# Altium schematic symbol library Communication-LIB-SCH.SchLib: 19 symbols
Pins are listed as number, name and electrical type; pins without a type are passive.

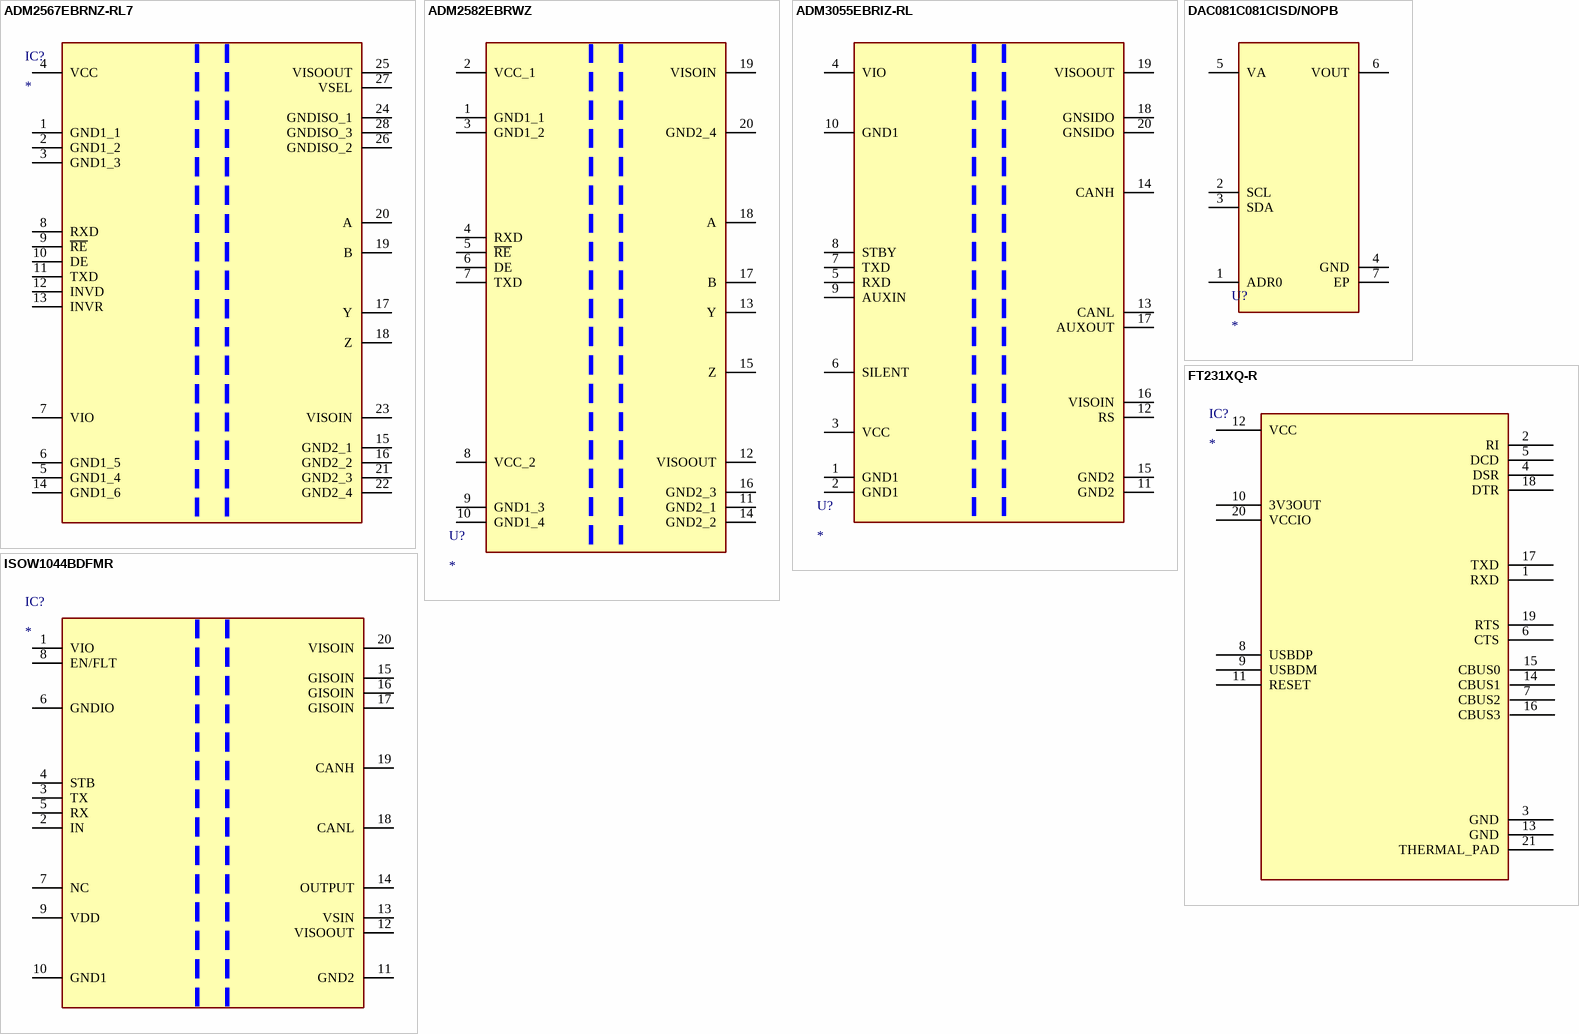
[diagram p0: symbols ADM2567EBRNZ-RL7 to ISOW1044BDFMR]

## ADM2567EBRNZ-RL7
designator IC?
Iso RS485 Transceiver; Manufacturer: Analog Devices; Manufacturer Part Number: ADM2567EBRNZ-RL7; Population Status: YES; Datasheet Link: https://www.analog.com/ADM2567E/datasheet; Height: 2.65mm; Supplier Part Number: 584-ADM2567EBRNZ-RL7
footprint SOP65P1030X265-28N
pins: 1 GND1_1, 2 GND1_2, 3 GND1_3, 4 VCC, 5 GND1_4, 6 GND1_5, 7 VIO, 8 RXD, 9 ~{RE}, 10 DE, 11 TXD, 12 INVD, 13 INVR, 14 GND1_6, 15 GND2_1, 16 GND2_2, 17 Y, 18 Z, 19 B, 20 A, 21 GND2_3, 22 GND2_4, 23 VISOIN, 24 GNDISO_1, 25 VISOOUT, 26 GNDISO_2, 27 VSEL, 28 GNDISO_3

## ADM2582EBRWZ
designator U?
RS422, RS485 Digital Isolator 2500Vrms 2 Channel 16Mbps 25kV/µs CMTI 20-SOIC (0.295", 7.50mm Width); Manufacturer: Analog Devices; Manufacturer Part Number: ADM2582EBRWZ; Max Current: 230mA; Supply Voltage: 3 to 5.5V; Est Price INR: 1,933.93; Population Status: YES; Datasheet Link: https://www.analog.com/media/en/technical-documentation/data-sheets/adm2582e-2587e.pdf; Height: 2.65mm; Supplier Part Number: 505-ADM2582EBRWZ-ND; Package: SOIC-20; Supplier: Digikey; Temperature Range: -40 to 85; Weight: 801mg
footprint SOIC127P1032X265-20N
pins: 1 GND1_1, 2 VCC_1, 3 GND1_2, 4 RXD, 5 ~{RE}, 6 DE, 7 TXD, 8 VCC_2, 9 GND1_3, 10 GND1_4, 11 GND2_1, 12 VISOOUT, 13 Y, 14 GND2_2, 15 Z, 16 GND2_3, 17 B, 18 A, 19 VISOIN, 20 GND2_4

## ADM3055EBRIZ-RL
designator U?
1/1 Transceiver, Isolated Half CANbus 12Mbit/s 20-SOIC-IC; Manufacturer: Analog Devices; Manufacturer Part Number: ADM3055EBRIZ-RL; Max Current: 177mA; Supply Voltage: 0.5 to 6V; Est Price INR: 1,719.17; Population Status: YES; Datasheet Link: https://www.analog.com/media/en/technical-documentation/data-sheets/ADM3055E-3057E.pdf; Height: 2.64mm; Supplier Part Number: 584-ADM3055EBRIZ-RL; Package: SOIC-20; Supplier: Mouser; Temperature Range: -40 to 105; Weight: 5.423 g
footprint SOIC127P1030X264-20N
pins: 1 GND1, 2 GND1, 3 VCC, 4 VIO, 5 RXD, 6 SILENT, 7 TXD, 8 STBY, 9 AUXIN, 10 GND1, 11 GND2, 12 RS, 13 CANL, 14 CANH, 15 GND2, 16 VISOIN, 17 AUXOUT, 18 GNSIDO, 19 VISOOUT, 20 GNSIDO

## DAC081C081CISD/NOPB
designator U?
8 Bit Digital to Analog Converter 1 6-WSON (2.2x2.5); Manufacturer Part Number: DAC081C081CISD/NOPB; Manufacturer: Texas Instruments; Est Price INR: 131.38; Population Status: YES; Supply Voltage: 2.7 to 5.5V; Datasheet Link: http://www.ti.com/lit/gpn/dac081c081; Height: 0.8mm; Package: WSON-6; Supplier Part Number: 926-DA081C081CISDNPB; Supplier: Mouser; Temperature Range: -40 to 125; Weight: 9.7mg
footprint SON65P250X220X80-7N
pins: 1 ADR0, 2 SCL, 3 SDA, 4 GND, 5 VA, 6 VOUT, 7 EP

## FT231XQ-R
designator IC?
Integrated Circuit; Manufacturer: FTDI Chip; Manufacturer Part Number: FT231XQ-R; Population Status: YES; Datasheet Link: http://www.ftdichip.com/Support/Documents/DataSheets/ICs/DS_FT231X.pdf; Height: 0.8mm; Supplier Part Number: 895-FT231XQ-R
footprint QFN50P400X400X80-21N
pins: 1 RXD, 2 RI, 3 GND, 4 DSR, 5 DCD, 6 CTS, 7 CBUS2, 8 USBDP, 9 USBDM, 10 3V3OUT, 11 RESET, 12 VCC, 13 GND, 14 CBUS1, 15 CBUS0, 16 CBUS3, 17 TXD, 18 DTR, 19 RTS, 20 VCCIO, 21 THERMAL_PAD

## ISOW1044BDFMR
designator IC?
Integrated Circuit; Manufacturer: Texas Instruments; Manufacturer Part Number: ISOW1044BDFMR; Population Status: YES; Datasheet Link: https://www.ti.com/lit/ds/symlink/isow1044.pdf?ts=1645295421849&ref_url=https%253A%252F%252Fwww.google.com%252F; Height: 3.55mm; Supplier Part Number: 595-ISOW1044BDFMR
footprint SOIC127P1030X355-20N
pins: 1 VIO, 2 IN, 3 TX, 4 STB, 5 RX, 6 GNDIO, 7 NC, 8 EN/FLT, 9 VDD, 10 GND1, 11 GND2, 12 VISOOUT, 13 VSIN, 14 OUTPUT, 15 GISOIN, 16 GISOIN, 17 GISOIN, 18 CANL, 19 CANH, 20 VISOIN

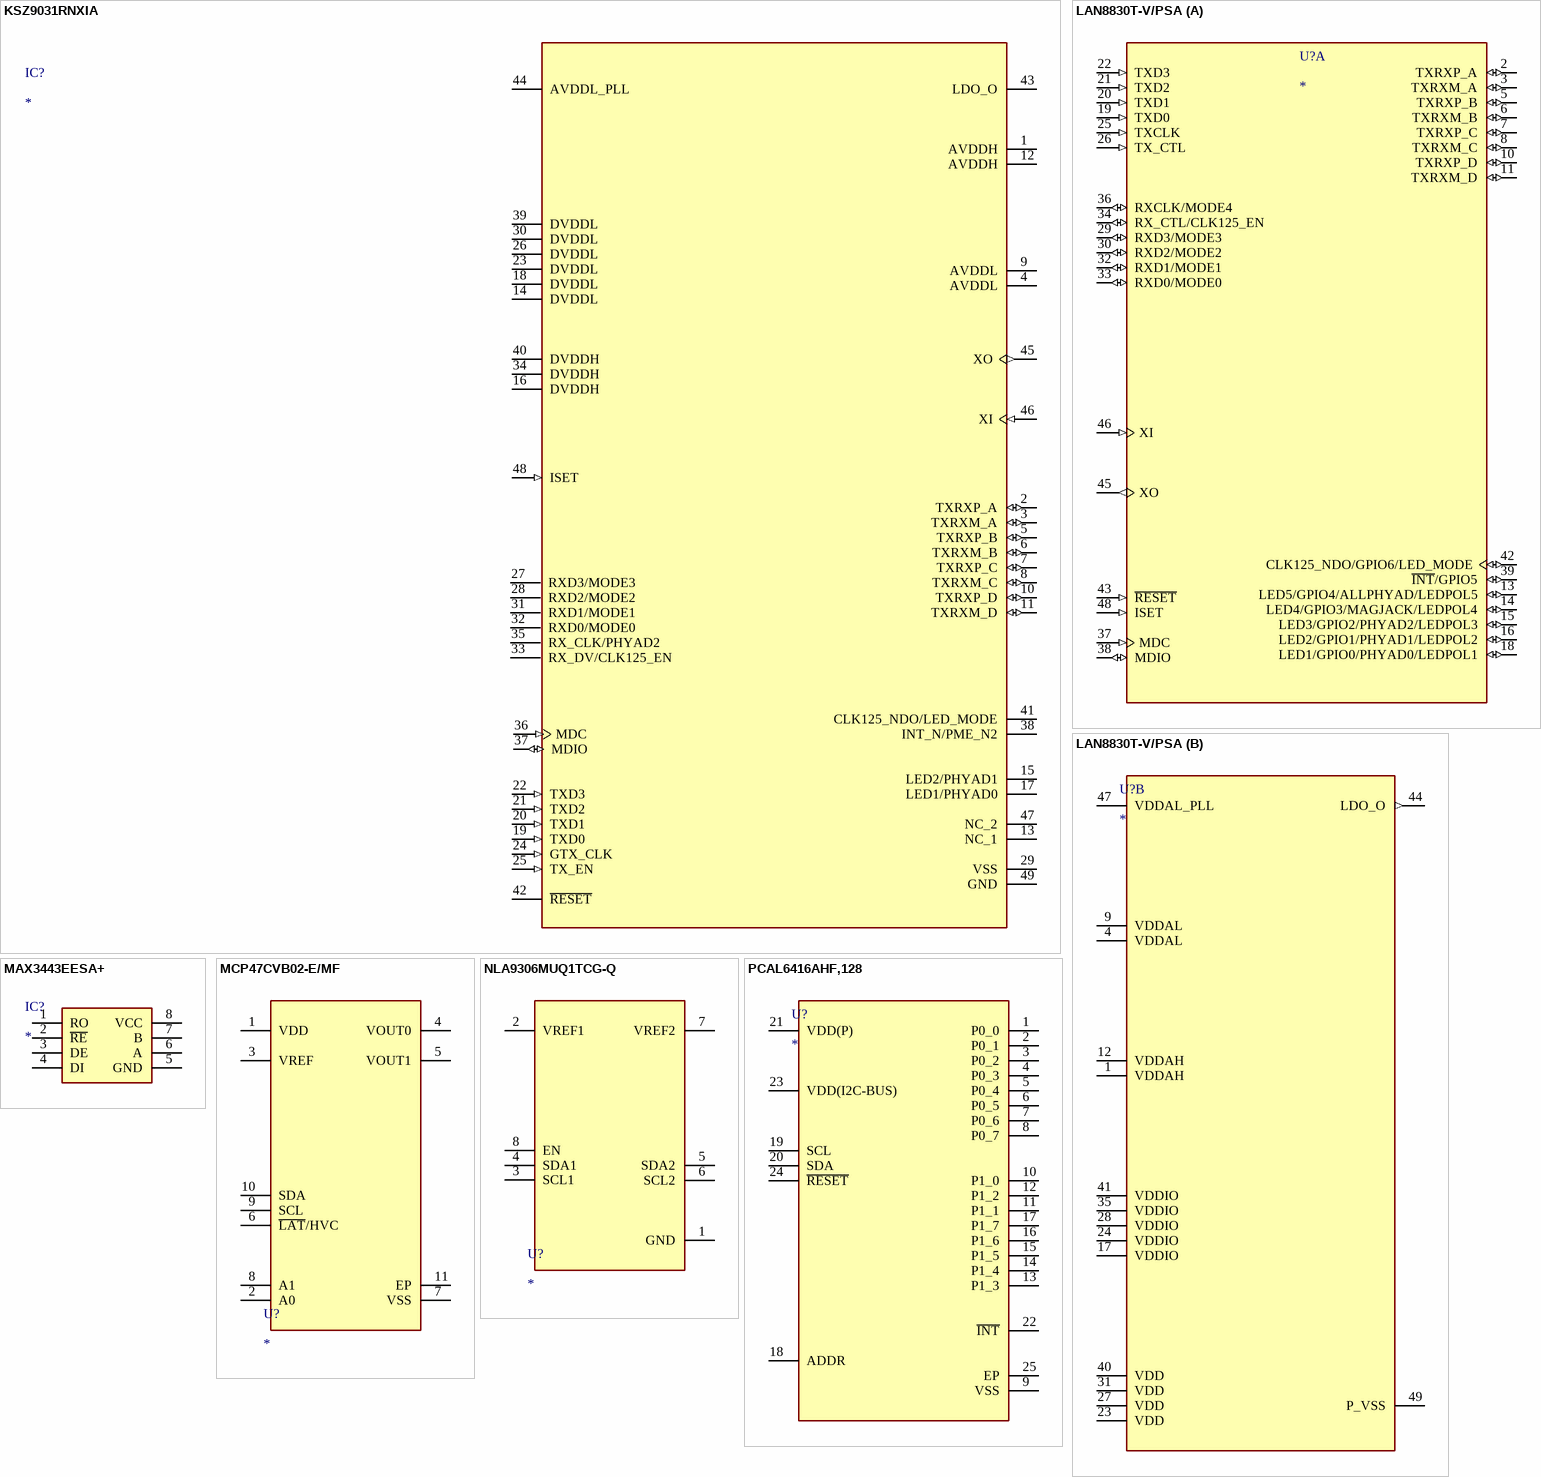
[diagram p1: symbols KSZ9031RNXIA to PCAL6416AHF,128]

## KSZ9031RNXIA
designator IC?
RGMII Ethernet Transceiver with VDDL LDO; Manufacturer: Microchip; Manufacturer Part Number: KSZ9031RNXIA; Population Status: YES; Datasheet Link: https://ww1.microchip.com/downloads/en/devicedoc/00002117f.pdf; Height: 0.9mm; Supplier Part Number: 998-KSZ9031RNXIA
footprint QFN50P700X700X90-49N
pins: 1 AVDDH, 2 TXRXP_A (io), 3 TXRXM_A (io), 4 AVDDL, 5 TXRXP_B (io), 6 TXRXM_B (io), 7 TXRXP_C (io), 8 TXRXM_C (io), 9 AVDDL, 10 TXRXP_D (io), 11 TXRXM_D (io), 12 AVDDH, 13 NC_1, 14 DVDDL, 15 LED2/PHYAD1, 16 DVDDH, 17 LED1/PHYAD0, 18 DVDDL, 19 TXD0 (in), 20 TXD1 (in), 21 TXD2 (in), 22 TXD3 (in), 23 DVDDL, 24 GTX_CLK (in), 25 TX_EN (in), 26 DVDDL, 27 RXD3/MODE3, 28 RXD2/MODE2, 29 VSS, 30 DVDDL, 31 RXD1/MODE1, 32 RXD0/MODE0, 33 RX_DV/CLK125_EN, 34 DVDDH, 35 RX_CLK/PHYAD2, 36 MDC (in), 37 MDIO (io), 38 INT_N/PME_N2, 39 DVDDL, 40 DVDDH, 41 CLK125_NDO/LED_MODE, 42 ~{RESET}, 43 LDO_O, 44 AVDDL_PLL, 45 XO (out), 46 XI (in), 47 NC_2, 48 ISET (in), 49 GND

## LAN8830T-V/PSA
designator U?
4/4 Transceiver Full, Half Ethernet 48-VQFN (7x7); Manufacturer: Microchip Technology; Manufacturer Part Number: LAN8830T-V/PSA; Population Status: YES; Package: None; Supplier: Mouser
footprint QFN50P700X700X100-49N
part A pins: 2 TXRXP_A (io), 3 TXRXM_A (io), 5 TXRXP_B (io), 6 TXRXM_B (io), 7 TXRXP_C (io), 8 TXRXM_C (io), 10 TXRXP_D (io), 11 TXRXM_D (io), 13 LED5/GPIO4/ALLPHYAD/LEDPOL5 (io), 14 LED4/GPIO3/MAGJACK/LEDPOL4 (io), 15 LED3/GPIO2/PHYAD2/LEDPOL3 (io), 16 LED2/GPIO1/PHYAD1/LEDPOL2 (io), 18 LED1/GPIO0/PHYAD0/LEDPOL1 (io), 19 TXD0 (in), 20 TXD1 (in), 21 TXD2 (in), 22 TXD3 (in), 25 TXCLK (in), 26 TX_CTL (in), 29 RXD3/MODE3 (io), 30 RXD2/MODE2 (io), 32 RXD1/MODE1 (io), 33 RXD0/MODE0 (io), 34 RX_CTL/CLK125_EN (io), 36 RXCLK/MODE4 (io), 37 MDC (in), 38 MDIO (io), 39 ~{INT}/GPIO5 (io), 42 CLK125_NDO/GPIO6/LED_MODE (io), 43 ~{RESET} (in), 45 XO (out), 46 XI (in), 48 ISET (in)
part B pins: 1 VDDAH (power), 4 VDDAL (power), 9 VDDAL (power), 12 VDDAH (power), 17 VDDIO (power), 23 VDD (power), 24 VDDIO (power), 27 VDD (power), 28 VDDIO (power), 31 VDD (power), 35 VDDIO (power), 40 VDD (power), 41 VDDIO (power), 44 LDO_O (out), 47 VDDAL_PLL (power), 49 P_VSS (power)

## MAX3443EESA+
designator IC?
Integrated Circuit; Manufacturer: Analog Devices; Manufacturer Part Number: MAX3443EESA+; Population Status: YES; Datasheet Link: https://datasheet.datasheetarchive.com/originals/distributors/Datasheets-DGA13/1189461.pdf; Height: 1.75mm; Supplier Part Number: 700-MAX3443EESA
footprint SOIC127P600X175-8N
pins: 1 RO, 2 ~{RE}, 3 DE, 4 DI, 5 GND, 6 A, 7 B, 8 VCC

## MCP47CVB02-E/MF
designator U?
Digital to Analog Converters - DAC I2C, Dual Channel, 8-Bit, Volatile; Manufacturer Part Number: MCP47CVB02-E/MF; Manufacturer: Microchip Technology; Est Price INR: 149.09; Population Status: YES; Supply Voltage: 5.5V; Datasheet Link: https://ww1.microchip.com/downloads/en/DeviceDoc/MCP47CXBXX-Data-Sheet-DS20006089B.pdf; Height: 1mm; Package: DFN-10; Supplier Part Number: 579-MCP47CVB02-E/MF; Supplier: Mouser; Temperature Range: -40 to 125; Weight: 422mg
footprint SON50P300X300X100-11N-D
pins: 1 VDD, 2 A0, 3 VREF, 4 VOUT0, 5 VOUT1, 6 ~{LAT}/HVC, 7 VSS, 8 A1, 9 SCL, 10 SDA, 11 EP

## NLA9306MUQ1TCG-Q
designator U?
Voltage Level Translator Bidirectional 1 Circuit 2 Channel 8-UQFN (1.6x1.6); Manufacturer Part Number: NLA9306MUQ1TCG-Q; Manufacturer: onsemi; Est Price INR: 39.14; Population Status: YES; Supply Voltage: 1 to 5.5V; Datasheet Link: https://www.onsemi.com/pub/Collateral/NLA9306-D.PDF; Height: 0.6mm; Package: UQFN-8; Supplier Part Number: 863-NLA9306MUQ1TCG-Q; Supplier: Mouser; Temperature Range: -40 to 125
footprint NLA9306MUQ1TCGQ
pins: 1 GND, 2 VREF1, 3 SCL1, 4 SDA1, 5 SDA2, 6 SCL2, 7 VREF2, 8 EN

## PCAL6416AHF,128
designator U?
I/O Expander 16 I2C, SMBus 400 kHz 24-HWQFN (4x4); Manufacturer: NXP; Manufacturer Part Number: PCAL6416AHF,128; Est Price INR: 148.16; Supply Voltage: 3.3V; Population Status: YES; Datasheet Link: http://www.nxp.com/docs/en/data-sheet/PCAL6416A.pdf; Height: 0.8mm; Supplier Part Number: 771-PCAL6416AHF,128; Package: HWQFN-24; Supplier: Mouser; Temperature Range: -40 to 85; Weight: 35.56mg
footprint QFN50P400X400X80-25N-D
pins: 1 P0_0, 2 P0_1, 3 P0_2, 4 P0_3, 5 P0_4, 6 P0_5, 7 P0_6, 8 P0_7, 9 VSS, 10 P1_0, 11 P1_1, 12 P1_2, 13 P1_3, 14 P1_4, 15 P1_5, 16 P1_6, 17 P1_7, 18 ADDR, 19 SCL, 20 SDA, 21 VDD(P), 22 ~{INT}, 23 VDD(I2C-BUS), 24 ~{RESET}, 25 EP

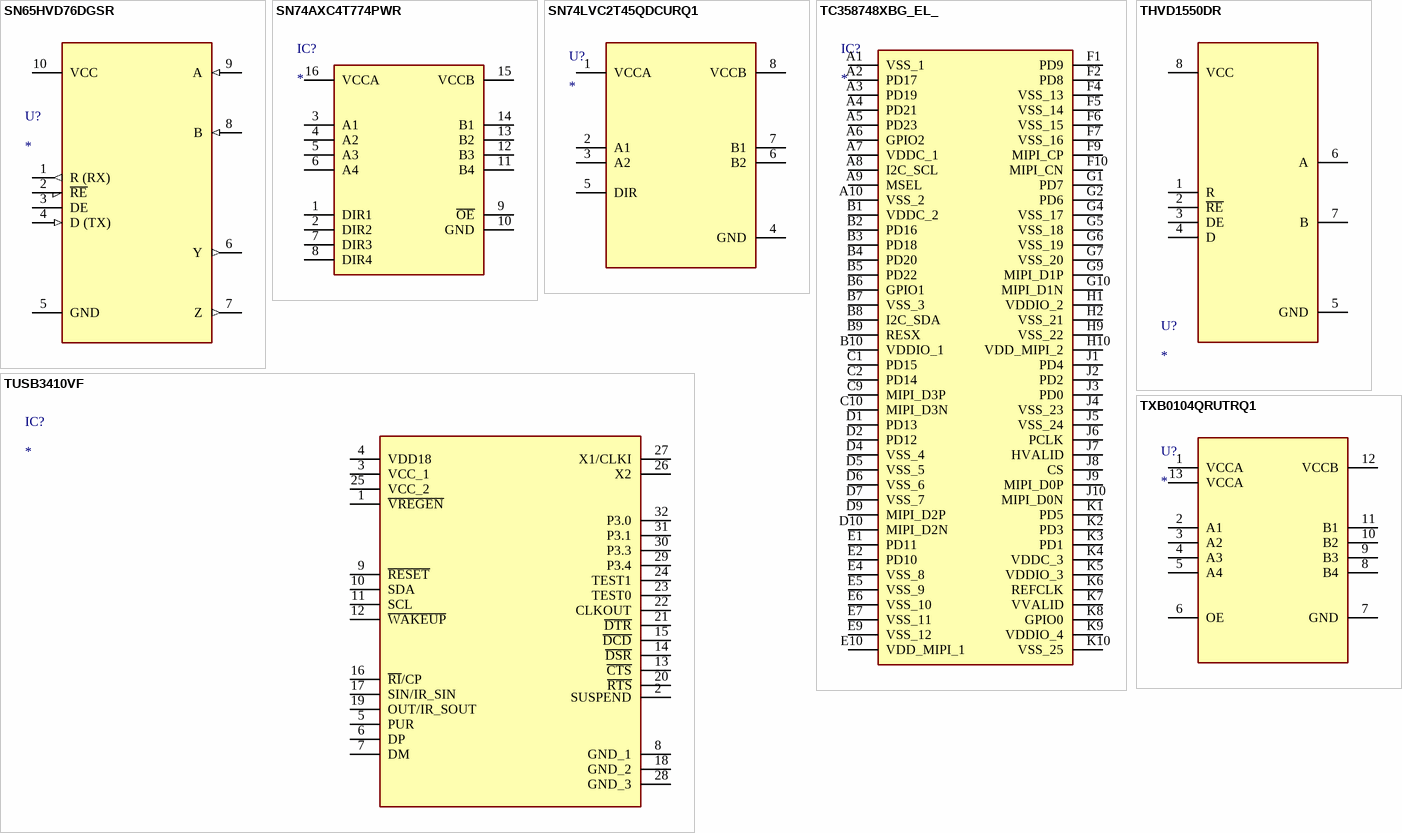
[diagram p2: symbols SN65HVD76DGSR to TXB0104QRUTRQ1]

## SN65HVD76DGSR
designator U?
RS-485 Interface IC 3.3V Full-Duplex 50Mbits/sec 12kV; Manufacturer: Texas Instruments; Manufacturer Part Number: SN65HVD76DGSR; Max Current: 60mA; Est Price INR: 443.54; Population Status: YES; Datasheet Link: http://www.ti.com/lit/gpn/sn65hvd76; Height: 1.1mm; Supplier Part Number: 595-SN65HVD76DGSR; Package: MSOP-10; Supplier: Mouser; Temperature Range: -40 to 125; Supply Voltage: 3.3V; Weight: 0.2g
footprint SOP50P490X110-10N
pins: 1 R (RX) (out), 2 ~{RE}, 3 DE, 4 D (TX) (in), 5 GND, 6 Y (out), 7 Z (out), 8 B (in), 9 A (in), 10 VCC

## SN74AXC4T774PWR
designator IC?
Integrated Circuit; Manufacturer: Texas Instruments; Manufacturer Part Number: SN74AXC4T774PWR; Population Status: YES; Datasheet Link: http://www.ti.com/lit/gpn/SN74AXC4T774; Height: 1.2mm; Supplier Part Number: 595-SN74AXC4T774PWR
footprint SOP65P640X120-16N
pins: 1 DIR1, 2 DIR2, 3 A1, 4 A2, 5 A3, 6 A4, 7 DIR3, 8 DIR4, 9 ~{OE}, 10 GND, 11 B4, 12 B3, 13 B2, 14 B1, 15 VCCB, 16 VCCA

## SN74LVC2T45QDCURQ1
designator U?
Translation - Voltage Levels AC DualB Dual Supply Xcvr; Manufacturer Part Number: SN74LVC2T45QDCURQ1; Manufacturer: Texas Instruments; Est Price INR: 109.02; Max Current: 100mA; Population Status: YES; Supply Voltage: -0.5 to 6.5V; Datasheet Link: http://www.ti.com/lit/ds/symlink/sn74lvc2t45-q1.pdf; Height: 0.9mm; Package: VSSOP-8; Supplier Part Number: 595-74LVC2T45QDCURQ1; Supplier: Mouser; Temperature Range: -40 to 125; Weight: 19mg
footprint SOP50P310X90-8N
pins: 1 VCCA, 2 A1, 3 A2, 4 GND, 5 DIR, 6 B2, 7 B1, 8 VCCB

## TC358748XBG_EL_
designator IC?
Integrated Circuit; Manufacturer: Toshiba; Manufacturer Part Number: TC358748XBG(EL); Population Status: YES; Datasheet Link: https://toshiba.semicon-storage.com/info/docget.jsp?did=30612&prodName=TC358748XBG; Height: 1mm; Supplier Part Number: 757-TC358748XBG-EL
footprint BGA80C65P10X10_700X700X100
pins: A1 VSS_1, A2 PD17, A3 PD19, A4 PD21, A5 PD23, A6 GPIO2, A7 VDDC_1, A8 I2C_SCL, A9 MSEL, A10 VSS_2, B1 VDDC_2, B2 PD16, B3 PD18, B4 PD20, B5 PD22, B6 GPIO1, B7 VSS_3, B8 I2C_SDA, B9 RESX, B10 VDDIO_1, C1 PD15, C2 PD14, C9 MIPI_D3P, C10 MIPI_D3N, D1 PD13, D2 PD12, D4 VSS_4, D5 VSS_5, D6 VSS_6, D7 VSS_7, D9 MIPI_D2P, D10 MIPI_D2N, E1 PD11, E2 PD10, E4 VSS_8, E5 VSS_9, E6 VSS_10, E7 VSS_11, E9 VSS_12, E10 VDD_MIPI_1, F1 PD9, F2 PD8, F4 VSS_13, F5 VSS_14, F6 VSS_15, F7 VSS_16, F9 MIPI_CP, F10 MIPI_CN, G1 PD7, G2 PD6, G4 VSS_17, G5 VSS_18, G6 VSS_19, G7 VSS_20, G9 MIPI_D1P, G10 MIPI_D1N, H1 VDDIO_2, H2 VSS_21, H9 VSS_22, H10 VDD_MIPI_2, J1 PD4, J2 PD2, J3 PD0, J4 VSS_23, J5 VSS_24, J6 PCLK, J7 HVALID, J8 CS, J9 MIPI_D0P, J10 MIPI_D0N, K1 PD5, K2 PD3, K3 PD1, K4 VDDC_3, K5 VDDIO_3, K6 REFCLK, K7 VVALID, K8 GPIO0, K9 VDDIO_4, K10 VSS_25

## THVD1550DR
designator U?
5-V RS-485 transceiver with ±18-kV IEC ESD protection; Manufacturer Part Number: THVD1550DR; Manufacturer: Texas Instruments; Est Price INR: 213.05; Max Current: 60 mA; Population Status: YES; Supply Voltage: 4.5 to 5.5V; Datasheet Link: http://www.ti.com/lit/gpn/thvd1550; Height: 1.75mm; Package: SOIC-8; Supplier Part Number: 595-THVD1550DR; Supplier: Mouser; Temperature Range: -40 to 125; Weight: 109.500 mg
footprint SOIC127P600X175-8N
pins: 1 R, 2 ~{RE}, 3 DE, 4 D, 5 GND, 6 A, 7 B, 8 VCC

## TUSB3410VF
designator IC?
Integrated Circuit; Manufacturer: Texas Instruments; Manufacturer Part Number: TUSB3410VF; Population Status: YES; Datasheet Link: http://www.ti.com/lit/ds/symlink/tusb3410.pdf; Height: 1.6mm; Supplier Part Number: 595-TUSB3410VF
footprint QFP80P900X900X160-32N
pins: 1 ~{VREGEN}, 2 SUSPEND, 3 VCC_1, 4 VDD18, 5 PUR, 6 DP, 7 DM, 8 GND_1, 9 ~{RESET}, 10 SDA, 11 SCL, 12 ~{WAKEUP}, 13 ~{CTS}, 14 ~{DSR}, 15 ~{DCD}, 16 ~{RI}/CP, 17 SIN/IR_SIN, 18 GND_2, 19 OUT/IR_SOUT, 20 ~{RTS}, 21 ~{DTR}, 22 CLKOUT, 23 TEST0, 24 TEST1, 25 VCC_2, 26 X2, 27 X1/CLKI, 28 GND_3, 29 P3.4, 30 P3.3, 31 P3.1, 32 P3.0

## TXB0104QRUTRQ1
designator U?
Integrated Circuit; Population Status: YES; Datasheet Link: http://www.ti.com/lit/ds/symlink/txb0104-q1.pdf; Height: 0.55mm; Supplier Part Number: 595-TXB0104QRUTRQ1
footprint TXB0104QRUTRQ1
pins: 1 VCCA, 2 A1, 3 A2, 4 A3, 5 A4, 6 OE, 7 GND, 8 B4, 9 B3, 10 B2, 11 B1, 12 VCCB, 13 VCCA